# Altium footprint library PcbLib1.PcbLib: 83 footprints (part 5 of 6)
Each footprint in its own frame and in the unit in brackets; x right, y up, seen from the top. Pads: shape width x height; smd on the part's side, far side on the other; paste and mask are expansions set on the pad; w line width, h text height; cw(c..) or ccw(c..) is an arc to the next point about the centre after c.
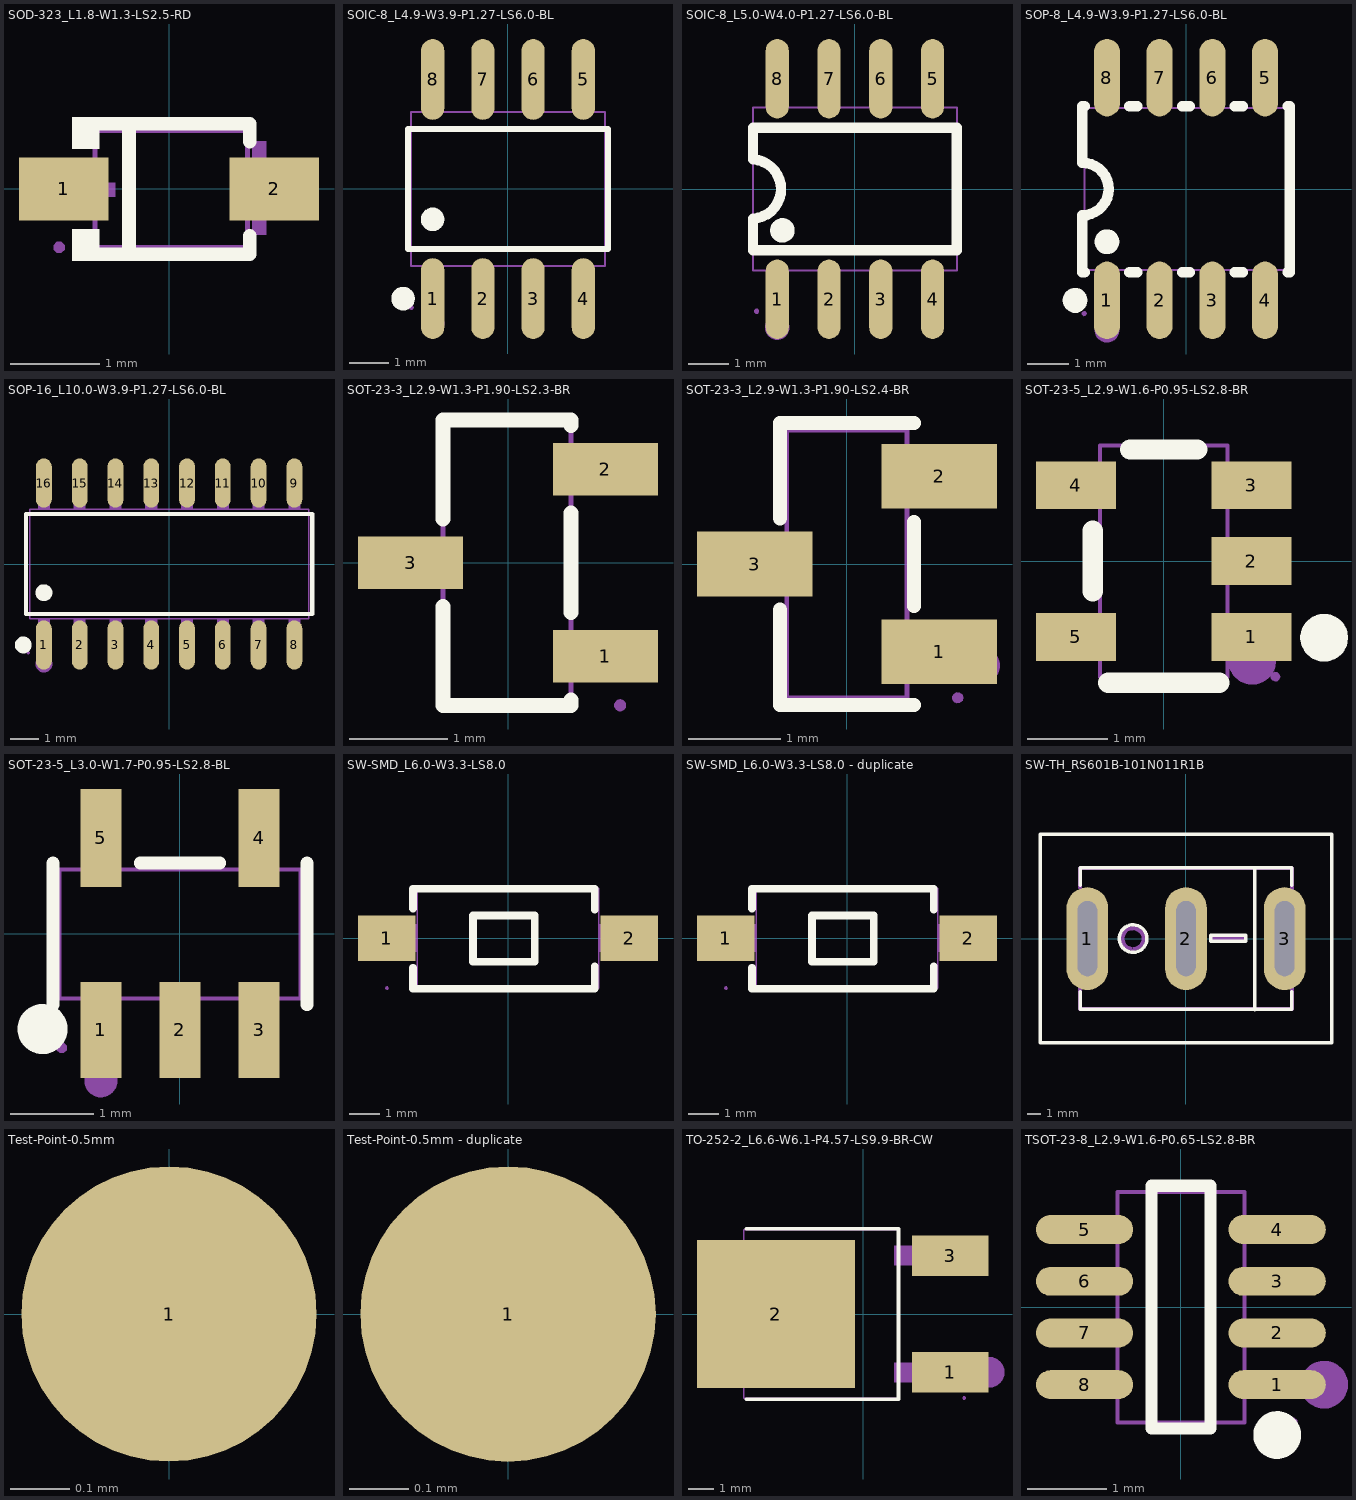
[diagram p4: the footprints below, top view; thin cyan lines are the x and y axes]

## SOD-323_L1.8-W1.3-LS2.5-RD [mm]
pads (2):
  rect 1x0.7 smd paste+0.051: 1(-1.172,0) 2(1.172,0)
Top Overlay:
  region: -0.775,0.802 -0.775,0.45 -1.08,0.45 -1.08,0.802
  region: -0.775,-0.803 -0.775,-0.45 -1.08,-0.45 -1.08,-0.803
  lines w0.152: -0.851,-0.726 0.901,-0.726 0.901,-0.52 ; -0.851,0.726 0.901,0.726 0.901,0.53 ; -0.447,-0.726 -0.447,0.726
Mechanical 6:
  region: -1.225,0.07 -1.225,-0.086 -0.601,-0.086 -0.601,0.07
  region: 1.315,0.09 1.315,-0.066 0.691,-0.066 0.691,0.09
  region: 1.083,0.53 1.083,-0.51 0.927,-0.51 0.927,0.53
Mechanical 7:
  lines w0.051: -0.825,-0.65 -0.825,0.65 0.875,0.65 0.875,-0.65 -0.825,-0.65
Mechanical 8:
  region: -1.225,-0.71 -1.25,-0.71 -1.285,-0.675 -1.285,-0.625 -1.25,-0.59 -1.225,-0.59 -1.2,-0.59 -1.165,-0.625 -1.165,-0.675 -1.2,-0.71 -1.225,-0.71
Mechanical 9:
  region: 1.275,0.16 1.275,-0.16 0.975,-0.16 0.975,0.16
  region: -0.925,0.16 -0.925,-0.16 -1.225,-0.16 -1.225,0.16
Mechanical 10:
  region: 0.985,0.16 0.985,-0.16 0.865,-0.16 0.865,0.16
  region: -0.815,0.16 -0.815,-0.16 -0.935,-0.16 -0.935,0.16

## SOIC-8_L4.9-W3.9-P1.27-LS6.0-BL [mil]
pads (8):
  oval 23.1x80.5 smd: 1(-75,-109.2) 2(-25,-109.2) 3(25,-109.2) 4(75,-109.2) 5(75,109.1) 6(25,109.1) 7(-25,109.1) 8(-75,109.1)
Top Overlay:
  lines w6: -99.5,-59.9 99.4,-59.9 99.4,59.9 -99.5,59.9 -99.5,-59.9
  lines w11.8: -110.3,-109.2 -110,-107.2 -108.9,-105.4 -107.4,-104.1 -105.4,-103.4 -103.4,-103.4 -101.4,-104.1 -99.9,-105.4 -98.8,-107.2 -98.5,-109.2 -98.8,-111.2 -99.9,-113 -101.4,-114.3 -103.4,-115 -105.4,-115 -107.4,-114.3 -108.9,-113 -110,-111.2 -110.3,-109.2 ; -80.9,-30.3 -80.6,-28.3 -79.5,-26.5 -78,-25.2 -76,-24.5 -74,-24.5 -72.1,-25.2 -70.5,-26.5 -69.5,-28.3 -69.1,-30.3 -69.5,-32.3 -70.5,-34.1 -72.1,-35.4 -74,-36.1 -76,-36.1 -78,-35.4 -79.5,-34.1 -80.6,-32.3 -80.9,-30.3
Mechanical 6:
  lines w11.8: -80.9,-133.9 -80.6,-131.9 -79.5,-130.1 -78,-128.8 -76,-128.1 -74,-128.1 -72.1,-128.8 -70.5,-130.1 -69.5,-131.9 -69.1,-133.9 -69.5,-135.9 -70.5,-137.7 -72.1,-139 -74,-139.7 -76,-139.7 -78,-139 -79.5,-137.7 -80.6,-135.9 -80.9,-133.9
Mechanical 7:
  lines w2: -96.5,-76.8 96.4,-76.8 96.4,76.7 -96.5,76.7 -96.5,-76.8
Mechanical 8:
  region: -94.1,-118.1 -94.5,-119.4 -95.5,-120.3 -96.8,-120.5 -98,-119.9 -98.7,-118.8 -98.7,-117.5 -98,-116.4 -96.8,-115.8 -95.5,-116 -94.5,-116.9
Mechanical 9:
  region: 66.7,118.1 66.7,85.2 83.3,85.2 83.3,118.1
  region: 16.7,118.1 16.7,85.2 33.3,85.2 33.3,118.1
  region: -33.3,118.1 -33.3,85.2 -16.7,85.2 -16.7,118.1
  region: -83.3,118.1 -83.3,85.2 -66.7,85.2 -66.7,118.1
  region: 66.7,-118.1 66.7,-85.3 83.3,-85.3 83.3,-118.1
  region: 16.7,-118.1 16.7,-85.3 33.3,-85.3 33.3,-118.1
  region: -33.3,-118.1 -33.3,-85.3 -16.7,-85.3 -16.7,-118.1
  region: -83.3,-118.1 -83.3,-85.3 -66.7,-85.3 -66.7,-118.1
Mechanical 10:
  region: 66.7,85.6 66.7,76.4 83.3,76.4 83.3,85.6
  region: 16.7,85.6 16.7,76.4 33.3,76.4 33.3,85.6
  region: -33.3,85.6 -33.3,76.4 -16.7,76.4 -16.7,85.6
  region: -83.3,85.6 -83.3,76.4 -66.7,76.4 -66.7,85.6
  region: 66.7,-85.7 66.7,-76.4 83.3,-76.4 83.3,-85.7
  region: 16.7,-85.7 16.7,-76.4 33.3,-76.4 33.3,-85.7
  region: -33.3,-85.7 -33.3,-76.4 -16.7,-76.4 -16.7,-85.7
  region: -83.3,-85.7 -83.3,-76.4 -66.7,-76.4 -66.7,-85.7

## SOIC-8_L5.0-W4.0-P1.27-LS6.0-BL [mil]
pads (8):
  oval 22.38x76.78 smd paste+2: 1(-75,-106.5) 2(-25,-106.5) 3(25,-106.5) 4(75,-106.5) 5(75,106.5) 6(25,106.5) 7(-25,106.5) 8(-75,106.5)
Top Overlay:
  circle w11.81: c-70,-40 r5.91
  lines w10: -98.43,-28.61 ccw(c-99.99,0) -98.23,28.59 ; -98.42,-28.61 -98.42,-59.05 98.42,-59.05 98.42,59.05 -98.42,59.05 -98.42,28.59
Mechanical 6:
  circle w11.81: c-75,-133.86 r5.91
Mechanical 7:
  lines w2: -98.42,-78.74 98.42,-78.74 98.42,78.74 -98.42,78.74 -98.42,-78.74
Mechanical 8:
  region: -92.64,-118.11 -92.64,-119.09 -94.02,-120.47 -95.98,-120.47 -97.36,-119.09 -97.36,-118.11 -97.36,-117.13 -95.98,-115.75 -94.02,-115.75 -92.64,-117.13 -92.64,-118.11
Mechanical 9:
  region: -83.07,-118.11 -83.07,-85.24 -66.93,-85.24 -66.93,-118.11
  region: -33.07,-118.11 -33.07,-85.24 -16.93,-85.24 -16.93,-118.11
  region: 16.93,-118.11 16.93,-85.24 33.07,-85.24 33.07,-118.11
  region: 66.93,-118.11 66.93,-85.24 83.07,-85.24 83.07,-118.11
  region: -83.07,85.24 -83.07,118.11 -66.93,118.11 -66.93,85.24
  region: -33.07,85.24 -33.07,118.11 -16.93,118.11 -16.93,85.24
  region: 16.93,85.24 16.93,118.11 33.07,118.11 33.07,85.24
  region: 66.93,85.24 66.93,118.11 83.07,118.11 83.07,85.24
Mechanical 10:
  region: -83.07,-85.63 -83.07,-76.38 -66.93,-76.38 -66.93,-85.63
  region: -33.07,-85.63 -33.07,-76.38 -16.93,-76.38 -16.93,-85.63
  region: 16.93,-85.63 16.93,-76.38 33.07,-76.38 33.07,-85.63
  region: 66.93,-85.63 66.93,-76.38 83.07,-76.38 83.07,-85.63
  region: -83.07,76.38 -83.07,85.63 -66.93,85.63 -66.93,76.38
  region: -33.07,76.38 -33.07,85.63 -16.93,85.63 -16.93,76.38
  region: 16.93,76.38 16.93,85.63 33.07,85.63 33.07,76.38
  region: 66.93,76.38 66.93,85.63 83.07,85.63 83.07,76.38

## SOP-8_L4.9-W3.9-P1.27-LS6.0-BL [mm]
pads (8):
  oval 0.63x1.864 smd: 1(-1.905,-2.682) 2(-0.635,-2.682) 3(0.635,-2.682) 4(1.905,-2.682) 5(1.905,2.682) 6(0.635,2.682) 7(-0.635,2.682) 8(-1.905,2.682)
Top Overlay:
  lines w0.254: -2.446,-2.002 -2.499,-2.002 -2.499,-0.635 -2.39,-0.627 -2.283,-0.597 -2.182,-0.551 -2.09,-0.488 -2.014,-0.409 -1.951,-0.32 -1.902,-0.218 -1.875,-0.112 -1.864,-0.003 -1.875,0.109 -1.902,0.216 -1.948,0.315 -2.012,0.406 -2.09,0.485 -2.182,0.549 -2.281,0.594 -2.388,0.625 -2.499,0.635 -2.499,1.999 -2.446,1.999 ; -1.361,-2.002 -1.176,-2.002 ; -1.361,1.999 -1.176,1.999 ; -0.091,-2.002 0.094,-2.002 ; -0.091,1.999 0.094,1.999 ; 1.179,-2.002 1.364,-2.002 ; 1.179,1.999 1.364,1.999 ; 2.449,1.999 2.499,1.999 2.499,-1.948 2.449,-2.002 2.499,-2.002
  lines w0.3: -2.822,-2.682 -2.812,-2.631 -2.786,-2.588 -2.746,-2.553 -2.697,-2.535 -2.647,-2.535 -2.596,-2.553 -2.558,-2.588 -2.53,-2.631 -2.522,-2.682 -2.53,-2.736 -2.558,-2.779 -2.596,-2.814 -2.647,-2.832 -2.697,-2.832 -2.746,-2.814 -2.786,-2.779 -2.812,-2.736 -2.822,-2.682 ; -2.055,-1.27 -2.045,-1.219 -2.019,-1.173 -1.979,-1.14 -1.93,-1.123 -1.88,-1.123 -1.829,-1.14 -1.791,-1.173 -1.763,-1.219 -1.755,-1.27 -1.763,-1.323 -1.791,-1.367 -1.829,-1.402 -1.88,-1.42 -1.93,-1.42 -1.979,-1.402 -2.019,-1.367 -2.045,-1.323 -2.055,-1.27
Mechanical 6:
  lines w0.3: -2.055,-3.401 -2.045,-3.35 -2.019,-3.305 -1.979,-3.272 -1.93,-3.254 -1.88,-3.254 -1.829,-3.272 -1.791,-3.305 -1.763,-3.35 -1.755,-3.401 -1.763,-3.452 -1.791,-3.498 -1.829,-3.531 -1.88,-3.548 -1.93,-3.548 -1.979,-3.531 -2.019,-3.498 -2.045,-3.452 -2.055,-3.401
Mechanical 7:
  lines w0.051: -2.449,-1.951 2.451,-1.951 2.451,1.948 -2.449,1.948 -2.449,-1.951
Mechanical 8:
  region: -2.39,-3 -2.4,-3.033 -2.426,-3.056 -2.459,-3.061 -2.489,-3.045 -2.507,-3.018 -2.507,-2.984 -2.489,-2.957 -2.459,-2.941 -2.426,-2.946 -2.4,-2.969
Mechanical 9:
  region: -2.116,-3 -2.116,-2.167 -1.694,-2.167 -1.694,-3
  region: -0.846,-3 -0.846,-2.167 -0.424,-2.167 -0.424,-3
  region: 0.424,-3 0.424,-2.167 0.846,-2.167 0.846,-3
  region: 1.694,-3 1.694,-2.167 2.116,-2.167 2.116,-3
  region: -2.116,2.164 -2.116,3 -1.694,3 -1.694,2.164
  region: -0.846,2.164 -0.846,3 -0.424,3 -0.424,2.164
  region: 0.424,2.164 0.424,3 0.846,3 0.846,2.164
  region: 1.694,2.164 1.694,3 2.116,3 2.116,2.164
Mechanical 10:
  region: -2.116,-2.177 -2.116,-1.941 -1.694,-1.941 -1.694,-2.177
  region: -0.846,-2.177 -0.846,-1.941 -0.424,-1.941 -0.424,-2.177
  region: 0.424,-2.177 0.424,-1.941 0.846,-1.941 0.846,-2.177
  region: 1.694,-2.177 1.694,-1.941 2.116,-1.941 2.116,-2.177
  region: -2.116,1.938 -2.116,2.174 -1.694,2.174 -1.694,1.938
  region: -0.846,1.938 -0.846,2.174 -0.424,2.174 -0.424,1.938
  region: 0.424,1.938 0.424,2.174 0.846,2.174 0.846,1.938
  region: 1.694,1.938 1.694,2.174 2.116,2.174 2.116,1.938

## SOP-16_L10.0-W3.9-P1.27-LS6.0-BL [mm]
pads (16):
  oval 0.56x1.745 smd paste+0.051: 1(-4.445,-2.872) 2(-3.175,-2.872) 3(-1.905,-2.872) 4(-0.635,-2.872) 5(0.635,-2.872) 6(1.905,-2.872) 7(3.175,-2.872) 8(4.445,-2.872) 9(4.445,2.872) 10(3.175,2.872) 11(1.905,2.872) 12(0.635,2.872) 13(-0.635,2.872) 14(-1.905,2.872) 15(-3.175,2.872) 16(-4.445,2.872)
Top Overlay:
  circle w0.3: c-5.177,-2.872 r0.15
  circle w0.3: c-4.445,-1.019 r0.15
  lines w0.152: -5.076,-1.771 5.076,-1.771 5.076,1.771 -5.076,1.771 -5.076,-1.771
Mechanical 6:
  circle w0.3: c-4.445,-3.55 r0.15
Mechanical 7:
  lines w0.051: -4.95,-1.95 4.95,-1.95 4.95,1.95 -4.95,1.95 -4.95,-1.95
Mechanical 8:
  region: -4.94,-3.15 -4.94,-3.175 -4.975,-3.21 -5.025,-3.21 -5.06,-3.175 -5.06,-3.15 -5.06,-3.125 -5.025,-3.09 -4.975,-3.09 -4.94,-3.125 -4.94,-3.15
Mechanical 9:
  region: -4.65,-3 -4.65,-2.165 -4.24,-2.165 -4.24,-3
  region: -3.38,-3 -3.38,-2.165 -2.97,-2.165 -2.97,-3
  region: -2.11,-3 -2.11,-2.165 -1.7,-2.165 -1.7,-3
  region: -0.84,-3 -0.84,-2.165 -0.43,-2.165 -0.43,-3
  region: 0.43,-3 0.43,-2.165 0.84,-2.165 0.84,-3
  region: 1.7,-3 1.7,-2.165 2.11,-2.165 2.11,-3
  region: 2.97,-3 2.97,-2.165 3.38,-2.165 3.38,-3
  region: 4.24,-3 4.24,-2.165 4.65,-2.165 4.65,-3
  region: -4.65,2.165 -4.65,3 -4.24,3 -4.24,2.165
  region: -3.38,2.165 -3.38,3 -2.97,3 -2.97,2.165
  region: -2.11,2.165 -2.11,3 -1.7,3 -1.7,2.165
  region: -0.84,2.165 -0.84,3 -0.43,3 -0.43,2.165
  region: 0.43,2.165 0.43,3 0.84,3 0.84,2.165
  region: 1.7,2.165 1.7,3 2.11,3 2.11,2.165
  region: 2.97,2.165 2.97,3 3.38,3 3.38,2.165
  region: 4.24,2.165 4.24,3 4.65,3 4.65,2.165
Mechanical 10:
  region: -4.65,-2.175 -4.65,-1.94 -4.24,-1.94 -4.24,-2.175
  region: -3.38,-2.175 -3.38,-1.94 -2.97,-1.94 -2.97,-2.175
  region: -2.11,-2.175 -2.11,-1.94 -1.7,-1.94 -1.7,-2.175
  region: -0.84,-2.175 -0.84,-1.94 -0.43,-1.94 -0.43,-2.175
  region: 0.43,-2.175 0.43,-1.94 0.84,-1.94 0.84,-2.175
  region: 1.7,-2.175 1.7,-1.94 2.11,-1.94 2.11,-2.175
  region: 2.97,-2.175 2.97,-1.94 3.38,-1.94 3.38,-2.175
  region: 4.24,-2.175 4.24,-1.94 4.65,-1.94 4.65,-2.175
  region: -4.65,1.94 -4.65,2.175 -4.24,2.175 -4.24,1.94
  region: -3.38,1.94 -3.38,2.175 -2.97,2.175 -2.97,1.94
  region: -2.11,1.94 -2.11,2.175 -1.7,2.175 -1.7,1.94
  region: -0.84,1.94 -0.84,2.175 -0.43,2.175 -0.43,1.94
  region: 0.43,1.94 0.43,2.175 0.84,2.175 0.84,1.94
  region: 1.7,1.94 1.7,2.175 2.11,2.175 2.11,1.94
  region: 2.97,1.94 2.97,2.175 3.38,2.175 3.38,1.94
  region: 4.24,1.94 4.24,2.175 4.65,2.175 4.65,1.94

## SOT-23-3_L2.9-W1.3-P1.90-LS2.3-BR [mm]
pads (3):
  rect 1.07x0.532 smd: 1(0.99,-0.95) 2(0.99,0.95) 3(-0.99,0)
Top Overlay:
  lines w0.152: -0.66,-0.446 -0.66,-1.45 0.64,-1.45 0.64,-1.396 ; -0.66,0.446 -0.66,1.45 0.64,1.45 0.64,1.396 ; 0.64,-0.504 0.64,0.504
Mechanical 2:
  circle w0.2: c1.13,-1 r0.1
Mechanical 6:
  lines w0.051: -0.66,-1.45 0.64,-1.45 0.64,1.45 -0.66,1.45 -0.66,-1.45
Mechanical 7:
  region: -0.73,0.2 -0.73,-0.2 -0.6,-0.2 -0.6,0.2
  region: 0.73,-1.15 0.73,-0.75 0.6,-0.75 0.6,-1.15
  region: 0.73,0.75 0.73,1.15 0.6,1.15 0.6,0.75
Mechanical 8:
  region: 1.2,-1.45 1.2,-1.455 1.198,-1.464 1.195,-1.473 1.191,-1.482 1.186,-1.489 1.179,-1.496 1.171,-1.501 1.163,-1.506 1.154,-1.509 1.145,-1.51 1.135,-1.51 1.126,-1.509 1.117,-1.506 1.108,-1.501 1.101,-1.496 1.094,-1.489 1.089,-1.482 1.084,-1.473 1.081,-1.464 1.08,-1.455 1.08,-1.45 1.08,-1.445 1.081,-1.436 1.084,-1.427 1.089,-1.419 1.094,-1.411 1.101,-1.404 1.108,-1.399 1.117,-1.395 1.126,-1.392 1.135,-1.39 1.145,-1.39 1.154,-1.392 1.163,-1.395 1.171,-1.399 1.179,-1.404 1.186,-1.411 1.191,-1.419 1.195,-1.427 1.198,-1.436 1.2,-1.445 1.2,-1.45
Mechanical 9:
  region: -0.71,-0.2 -0.71,0.2 -1.16,0.2 -1.16,-0.2
  region: 0.69,0.75 0.69,1.15 1.14,1.15 1.14,0.75
  region: 0.69,-1.15 0.69,-0.75 1.14,-0.75 1.14,-1.15

## SOT-23-3_L2.9-W1.3-P1.90-LS2.4-BR [mm]
pads (3):
  rect 1.25x0.701 smd: 1(1.001,-0.95) 2(1.001,0.95) 3(-0.998,0)
Top Overlay:
  lines w0.152: -0.726,-0.495 -0.726,-1.527 0.726,-1.527 ; -0.726,0.495 -0.726,1.527 0.726,1.527 ; 0.726,-0.455 0.726,0.455
Mechanical 6:
  lines w0.201: 1.361,-1.1 1.372,-1.057 1.397,-1.021 1.438,-1.003 1.483,-1.003 1.524,-1.021 1.549,-1.057 1.56,-1.1 1.549,-1.143 1.524,-1.179 1.483,-1.196 1.438,-1.196 1.397,-1.179 1.372,-1.143 1.361,-1.1
Mechanical 7:
  lines w0.051: -0.65,-1.45 0.65,-1.45 0.65,1.45 -0.65,1.45 -0.65,-1.45
Mechanical 8:
  region: 1.26,-1.45 1.252,-1.483 1.224,-1.504 1.191,-1.509 1.161,-1.496 1.143,-1.466 1.143,-1.433 1.161,-1.405 1.191,-1.389 1.224,-1.394 1.252,-1.417
Mechanical 9:
  region: -1.199,-0.216 -1.199,0.216 -0.899,0.216 -0.899,-0.216
  region: 0.902,-1.166 0.902,-0.734 1.201,-0.734 1.201,-1.166
  region: 0.902,0.734 0.902,1.166 1.201,1.166 1.201,0.734
Mechanical 10:
  region: -0.909,-0.216 -0.909,0.216 -0.64,0.216 -0.64,-0.216
  region: 0.64,-1.166 0.64,-0.734 0.909,-0.734 0.909,-1.166
  region: 0.64,0.734 0.64,1.166 0.909,1.166 0.909,0.734

## SOT-23-5_L2.9-W1.6-P0.95-LS2.8-BR [mm]
pads (5):
  rect 1.001x0.599 smd paste+0 mask+0.051: 1(1.1,-0.95) 2(1.1,0) 3(1.1,0.95) 4(-1.1,0.95) 5(-1.1,-0.95)
Top Overlay:
  lines w0.254: -0.889,-0.381 -0.889,0.381 ; -0.699,-1.524 0.699,-1.524 ; -0.422,1.397 0.422,1.397
  lines w0.3: 1.859,-0.96 1.869,-0.907 1.895,-0.864 1.935,-0.831 1.984,-0.81 2.037,-0.81 2.085,-0.831 2.126,-0.864 2.151,-0.907 2.159,-0.96 2.151,-1.011 2.126,-1.057 2.085,-1.09 2.037,-1.107 1.984,-1.107 1.935,-1.09 1.895,-1.057 1.869,-1.011 1.859,-0.96
Mechanical 6:
  lines w0.3: 0.96,-1.25 0.968,-1.199 0.996,-1.153 1.034,-1.12 1.085,-1.102 1.135,-1.102 1.184,-1.12 1.224,-1.153 1.25,-1.199 1.26,-1.25 1.25,-1.3 1.224,-1.346 1.184,-1.379 1.135,-1.397 1.085,-1.397 1.034,-1.379 0.996,-1.346 0.968,-1.3 0.96,-1.25
Mechanical 7:
  lines w0.051: -0.8,-1.45 -0.8,1.45 0.8,1.45 0.8,-1.45 -0.8,-1.45
Mechanical 8:
  region: 1.46,-1.45 1.45,-1.481 1.425,-1.504 1.392,-1.509 1.361,-1.494 1.341,-1.466 1.341,-1.433 1.361,-1.405 1.392,-1.389 1.425,-1.394 1.45,-1.417
Mechanical 9:
  region: 1.4,-0.198 0.95,-0.198 0.95,0.201 1.4,0.201
  region: 1.4,0.752 0.95,0.752 0.95,1.151 1.4,1.151
  region: 1.4,-1.148 0.95,-1.148 0.95,-0.749 1.4,-0.749
  region: -0.95,0.752 -1.4,0.752 -1.4,1.151 -0.95,1.151
  region: -0.95,-1.148 -1.4,-1.148 -1.4,-0.749 -0.95,-0.749
Mechanical 10:
  region: 0.96,-0.198 0.79,-0.198 0.79,0.201 0.96,0.201
  region: 0.96,0.752 0.79,0.752 0.79,1.151 0.96,1.151
  region: 0.96,-1.148 0.79,-1.148 0.79,-0.749 0.96,-0.749
  region: -0.79,0.752 -0.96,0.752 -0.96,1.151 -0.79,1.151
  region: -0.79,-1.148 -0.96,-1.148 -0.96,-0.749 -0.79,-0.749

## SOT-23-5_L3.0-W1.7-P0.95-LS2.8-BL [mm]
pads (5):
  rect 0.49x1.157 smd paste+0.051: 1(-0.95,-1.154) 2(0,-1.154) 3(0.95,-1.154)
  rect 0.49x1.175 smd paste+0.051: 4(0.95,1.154) 5(-0.95,1.154)
Top Overlay:
  circle w0.3: c-1.651,-1.143 r0.15
  lines w0.152: -1.526,-0.851 -1.526,0.851 ; -0.476,0.851 0.476,0.851 ; 1.526,-0.851 1.526,0.851
Mechanical 6:
  circle w0.2: c-0.95,-1.763 r0.1
Mechanical 7:
  lines w0.051: -1.45,-0.775 1.45,-0.775 1.45,0.775 -1.45,0.775 -1.45,-0.775
Mechanical 8:
  region: -1.48,-1.37 -1.48,-1.345 -1.445,-1.31 -1.395,-1.31 -1.36,-1.345 -1.36,-1.37 -1.36,-1.395 -1.395,-1.43 -1.445,-1.43 -1.48,-1.395 -1.48,-1.37
Mechanical 9:
  region: -1.125,1 -1.125,1.4 -0.775,1.4 -0.775,1
  region: 0.775,1 0.775,1.4 1.125,1.4 1.125,1
  region: 0.775,-1.4 0.775,-1 1.125,-1 1.125,-1.4
  region: -0.175,-1.4 -0.175,-1 0.175,-1 0.175,-1.4
  region: -1.125,-1.4 -1.125,-1 -0.775,-1 -0.775,-1.4
Mechanical 10:
  region: -1.125,0.74 -1.125,1.01 -0.775,1.01 -0.775,0.74
  region: 0.775,0.74 0.775,1.01 1.125,1.01 1.125,0.74
  region: 0.775,-1.01 0.775,-0.74 1.125,-0.74 1.125,-1.01
  region: -0.175,-1.01 -0.175,-0.74 0.175,-0.74 0.175,-1.01
  region: -1.125,-1.01 -1.125,-0.74 -0.775,-0.74 -0.775,-1.01

## SW-SMD_L6.0-W3.3-LS8.0 [mil]
pads (2):
  rect 74.8x59.1 smd: 1(-157.5,0) 2(157.5,0)
Top Overlay:
  lines w10: -123.5,-38.6 -123.5,-65.7 112.7,-65.7 112.7,-36.8 ; -123.5,38.6 -123.5,64.3 112.7,64.3 112.7,36.8 ; -45.4,-30.7 -45.4,29.3 34.6,29.3 34.6,-30.7 -45.4,-30.7
Mechanical 7:
  lines w2: -118.1,-65 118.1,-65 118.1,65 -118.1,65 -118.1,-65
Mechanical 8:
  region: -155.1,-65 -155.5,-66.2 -156.5,-67.1 -157.8,-67.3 -159,-66.7 -159.7,-65.6 -159.7,-64.3 -159,-63.2 -157.8,-62.6 -156.5,-62.8 -155.5,-63.7
Mechanical 9:
  region: 129.9,-17.7 129.9,17.7 157.5,17.7 157.5,-17.7
  region: -157.5,-17.7 -157.5,17.7 -129.9,17.7 -129.9,-17.7
Mechanical 10:
  region: -142.5,-17.7 -142.5,17.7 -117.7,17.7 -117.7,-17.7
  region: 142.5,17.7 142.5,-17.7 117.7,-17.7 117.7,17.7

## SW-SMD_L6.0-W3.3-LS8.0 - duplicate [mil]
pads (2):
  rect 74.8x59.1 smd: 1(-157.5,0) 2(157.5,0)
Top Overlay:
  lines w10: -123.5,-38.6 -123.5,-65.7 112.7,-65.7 112.7,-36.8 ; -123.5,38.6 -123.5,64.3 112.7,64.3 112.7,36.8 ; -45.4,-30.7 34.6,-30.7 34.6,29.3 -45.4,29.3 -45.4,-30.7
Mechanical 7:
  lines w2: -118.1,-65 -118.1,65 118.1,65 118.1,-65 -118.1,-65
Mechanical 8:
  region: -155.1,-65 -155.5,-66.2 -156.5,-67.1 -157.8,-67.3 -159,-66.7 -159.7,-65.6 -159.7,-64.3 -159,-63.2 -157.8,-62.6 -156.5,-62.8 -155.5,-63.7
Mechanical 9:
  region: -157.5,-17.7 -157.5,17.7 -129.9,17.7 -129.9,-17.7
  region: 129.9,-17.7 129.9,17.7 157.5,17.7 157.5,-17.7
Mechanical 10:
  region: 142.5,17.7 142.5,-17.7 117.7,-17.7 117.7,17.7
  region: -142.5,-17.7 -142.5,17.7 -117.7,17.7 -117.7,-17.7

## SW-TH_RS601B-101N011R1B [mm]
pads (3):
  oval 3x7.4 hole 1.4 slot 5.4 at 90 deg paste+0.051: 1(-7.1,0) 2(0,0) 3(7.1,0)
Top Overlay:
  circle w0.254: c-3.81,0 r0.992
  lines w0.254: -10.5,-7.5 10.5,-7.5 10.5,7.5 -10.5,7.5 -10.5,-7.493 ; -7.6,-3.824 -7.6,-5.1 7.6,-5.1 7.6,-3.824 ; -7.6,3.824 -7.6,5.1 7.6,5.1 7.6,3.824 ; 4.953,-5.12 4.953,5.08 ; 1.778,-0.191 1.778,0.254 4.318,0.254 4.318,-0.191 1.778,-0.191
Mechanical 6:
  region: 1.778,-0.127 1.778,0.254 4.318,0.254 4.318,-0.127
  region: -3.81,-0.635 -3.689,-0.623 -3.465,-0.53 -3.294,-0.359 -3.201,-0.135 -3.189,-0.014 -3.189,0 -3.201,0.119 -3.292,0.339 -3.46,0.507 -3.68,0.598 -3.799,0.61 -3.869,0.61 -3.978,0.599 -4.18,0.516 -4.335,0.361 -4.418,0.159 -4.429,0.05 -4.429,-0.01 -4.429,-0.05 -4.418,-0.159 -4.335,-0.361 -4.18,-0.516 -3.978,-0.599 -3.869,-0.61 -3.869,-0.88 -3.949,-0.88 -4.105,-0.849 -4.253,-0.788 -4.385,-0.699 -4.498,-0.586 -4.587,-0.454 -4.648,-0.306 -4.679,-0.15 -4.679,-0.07 -4.679,0.02 -4.679,0.03 -4.679,0.114 -4.646,0.278 -4.582,0.433 -4.489,0.572 -4.371,0.69 -4.232,0.783 -4.077,0.847 -3.913,0.88 -3.829,0.88 -3.742,0.88 -3.572,0.846 -3.412,0.78 -3.268,0.684 -3.145,0.561 -3.049,0.417 -2.983,0.257 -2.949,0.087 -2.949,0 -2.949,-0.086 -2.982,-0.254 -3.048,-0.412 -3.143,-0.555 -3.264,-0.676 -3.407,-0.771 -3.565,-0.837 -3.733,-0.87 -3.819,-0.87
  region: -7.747,3.683 -7.747,5.08 -7.747,5.105 -7.728,5.152 -7.692,5.188 -7.645,5.207 -7.62,5.207 7.62,5.207 7.645,5.207 7.692,5.188 7.728,5.152 7.747,5.105 7.747,5.08 7.747,-5.08 7.747,-5.105 7.728,-5.152 7.692,-5.188 7.645,-5.207 7.62,-5.207 -7.62,-5.207 -7.645,-5.207 -7.692,-5.188 -7.728,-5.152 -7.747,-5.105 -7.747,-5.08 -7.747,3.302 -7.747,3.355 -7.673,3.429 -7.567,3.429 -7.493,3.355 -7.493,3.302 -7.493,-4.953 7.493,-4.953 7.493,4.953 -7.493,4.953 -7.493,3.683 -7.493,3.63 -7.567,3.556 -7.673,3.556 -7.747,3.63 -7.747,3.683
Mechanical 7:
  lines w0.051: -10.5,-7.5 10.5,-7.5 10.5,7.5 -10.5,7.5 -10.5,-7.5
Mechanical 8:
  region: -10.44,-7.5 -10.44,-7.525 -10.475,-7.56 -10.525,-7.56 -10.56,-7.525 -10.56,-7.5 -10.56,-7.475 -10.525,-7.44 -10.475,-7.44 -10.44,-7.475 -10.44,-7.5
Mechanical 9:
  region: 7.5,-2.4 6.7,-2.4 6.7,2.4 7.5,2.4
  region: 0.4,-2.4 -0.4,-2.4 -0.4,2.4 0.4,2.4
  region: -6.7,-2.4 -7.5,-2.4 -7.5,2.4 -6.7,2.4

## Test-Point-0.5mm [mm]
pads (1):
  round 0.5 smd paste+0.051: 1(0,0)

## Test-Point-0.5mm - duplicate [mm]
pads (1):
  round 0.5 smd: 1(0,0)

## TO-252-2_L6.6-W6.1-P4.57-LS9.9-BR-CW [mm]
pads (3):
  rect 3x1.6 smd paste+0.051: 1(3.424,-2.29) 3(3.424,2.29)
  rect 6.2x5.8 smd paste+0.051: 2(-3.424,0)
Top Overlay:
  lines w0.152: -4.585,-3.346 1.383,-3.346 1.383,3.346 -4.585,3.346
Mechanical 6:
  circle w0.6: c4.953,-2.286 r0.3
Mechanical 7:
  lines w0.051: -4.698,-3.298 -4.698,3.302 1.397,3.302 1.397,-3.298 -4.698,-3.298
Mechanical 8:
  region: 4.021,-3.298 4.021,-3.323 3.986,-3.358 3.937,-3.358 3.901,-3.323 3.901,-3.298 3.901,-3.273 3.937,-3.238 3.986,-3.238 4.021,-3.273 4.021,-3.298
Mechanical 9:
  region: -4.954,2.505 -0.938,2.505 -0.938,-2.505 -4.954,-2.505 -5.954,-1.505 -5.954,1.505
  region: 2.371,1.91 2.371,2.67 3.961,2.67 3.961,1.91
  region: 2.371,-2.67 2.371,-1.91 3.961,-1.91 3.961,-2.67
Mechanical 10:
  region: 1.211,1.91 1.211,2.67 2.381,2.67 2.381,1.91
  region: 1.211,-2.67 1.211,-1.91 2.381,-1.91 2.381,-2.67

## TSOT-23-8_L2.9-W1.6-P0.65-LS2.8-BR [mm]
pads (8):
  oval 1.222x0.364 smd paste+0.051: 1(1.211,-0.975) 2(1.211,-0.325) 3(1.211,0.325) 4(1.211,0.975) 5(-1.211,0.975) 6(-1.211,0.325) 7(-1.211,-0.325) 8(-1.211,-0.975)
Top Overlay:
  circle w0.3: c1.211,-1.609 r0.15
  lines w0.152: -0.371,-1.526 -0.371,1.526 0.371,1.526 0.371,-1.526 -0.371,-1.526
Mechanical 6:
  circle w0.3: c1.8,-0.975 r0.15
Mechanical 7:
  lines w0.051: -0.8,-1.45 -0.8,1.45 0.8,1.45 0.8,-1.45 -0.8,-1.45
Mechanical 8:
  region: 1.4,-1.39 1.425,-1.39 1.46,-1.425 1.46,-1.475 1.425,-1.51 1.4,-1.51 1.375,-1.51 1.34,-1.475 1.34,-1.425 1.375,-1.39 1.4,-1.39
Mechanical 9:
  region: -1.4,0.825 -1,0.825 -1,1.125 -1.4,1.125
  region: -1.4,0.175 -1,0.175 -1,0.475 -1.4,0.475
  region: -1.4,-0.475 -1,-0.475 -1,-0.175 -1.4,-0.175
  region: -1.4,-1.125 -1,-1.125 -1,-0.825 -1.4,-0.825
  region: 1.4,0.825 1,0.825 1,1.125 1.4,1.125
  region: 1.4,0.175 1,0.175 1,0.475 1.4,0.475
  region: 1.4,-0.475 1,-0.475 1,-0.175 1.4,-0.175
  region: 1.4,-1.125 1,-1.125 1,-0.825 1.4,-0.825
Mechanical 10:
  region: -1.01,0.825 -0.79,0.825 -0.79,1.125 -1.01,1.125
  region: -1.01,0.175 -0.79,0.175 -0.79,0.475 -1.01,0.475
  region: -1.01,-0.475 -0.79,-0.475 -0.79,-0.175 -1.01,-0.175
  region: -1.01,-1.125 -0.79,-1.125 -0.79,-0.825 -1.01,-0.825
  region: 1.01,0.825 0.79,0.825 0.79,1.125 1.01,1.125
  region: 1.01,0.175 0.79,0.175 0.79,0.475 1.01,0.475
  region: 1.01,-0.475 0.79,-0.475 0.79,-0.175 1.01,-0.175
  region: 1.01,-1.125 0.79,-1.125 0.79,-0.825 1.01,-0.825